# EAGLE library part NVMFS6H836NLT1G (library NVMFS6H836NLT1G)
N-Channel 80 V 16A (Ta), 77A (Tc) 3.7W (Ta), 89W (Tc) Surface Mount 5-DFN (5x6) (8-SOFL) Source: Datasheet <https://www.onsemi.com/download/data-sheet/pdf/nvmfs6h836nl-d.pdf>
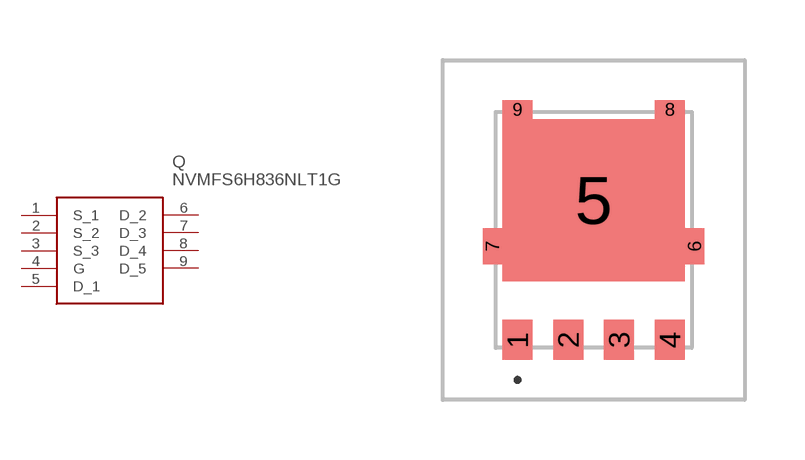
[diagram p0: symbol with the pads of NVMFS5C442NLWFAFT1G; footprint NVMFS5C442NLWFAFT1G]

Designator prefix Q

## NVMFS6H836NLT1G (Description: N-Channel 80 V 16A (Ta), 77A (Tc) 3.7W (Ta), 89W (Tc) Surface Mount 5-DFN (5x6) (8-SOFL); Height: mm; Manufacturer_Name: onsemi; Manufacturer_Part_Number: NVMFS6H836NLT1G; Mouser_Part_Number: 863-NVMFS6H836NLT1G; Mouser_Price-Stock: https://www.mouser.co.uk/ProductDetail/onsemi/NVMFS6H836NLT1G?qs=xZ%2FP%252Ba9zWqbgFUlh527L7Q%3D%3D)  [NVMFS5C442NLWFAFT1G]
1  S_1
2  S_2
3  S_3
4  G
5  D_1
6  D_2
7  D_3
8  D_4
9  D_5

## Footprint NVMFS5C442NLWFAFT1G (pad centres in mm)
DFN5 5x6, 1.27P (SO−8FL) CASE 488AA ISSUE N
smd 0.75 x 1: 1 -1.905,-2.748; 2 -0.635,-2.748; 3 0.635,-2.748; 4 1.905,-2.748
smd 4.56 x 4.055: 5 0,0.745
smd 0.495 x 0.905: 6 2.527,-0.405; 7 -2.527,-0.405
smd 0.75 x 0.475: 8 1.905,3.01; 9 -1.905,3.01